# Altium footprint library Package_DFN_QFN.PcbLib: 735 footprints (part 25 of 46)
Each footprint in its own frame and in the unit in brackets; x right, y up, seen from the top. Pads: shape width x height; smd on the part's side, far side on the other; paste and mask are expansions set on the pad; w line width, h text height; cw(c..) or ccw(c..) is an arc to the next point about the centre after c.
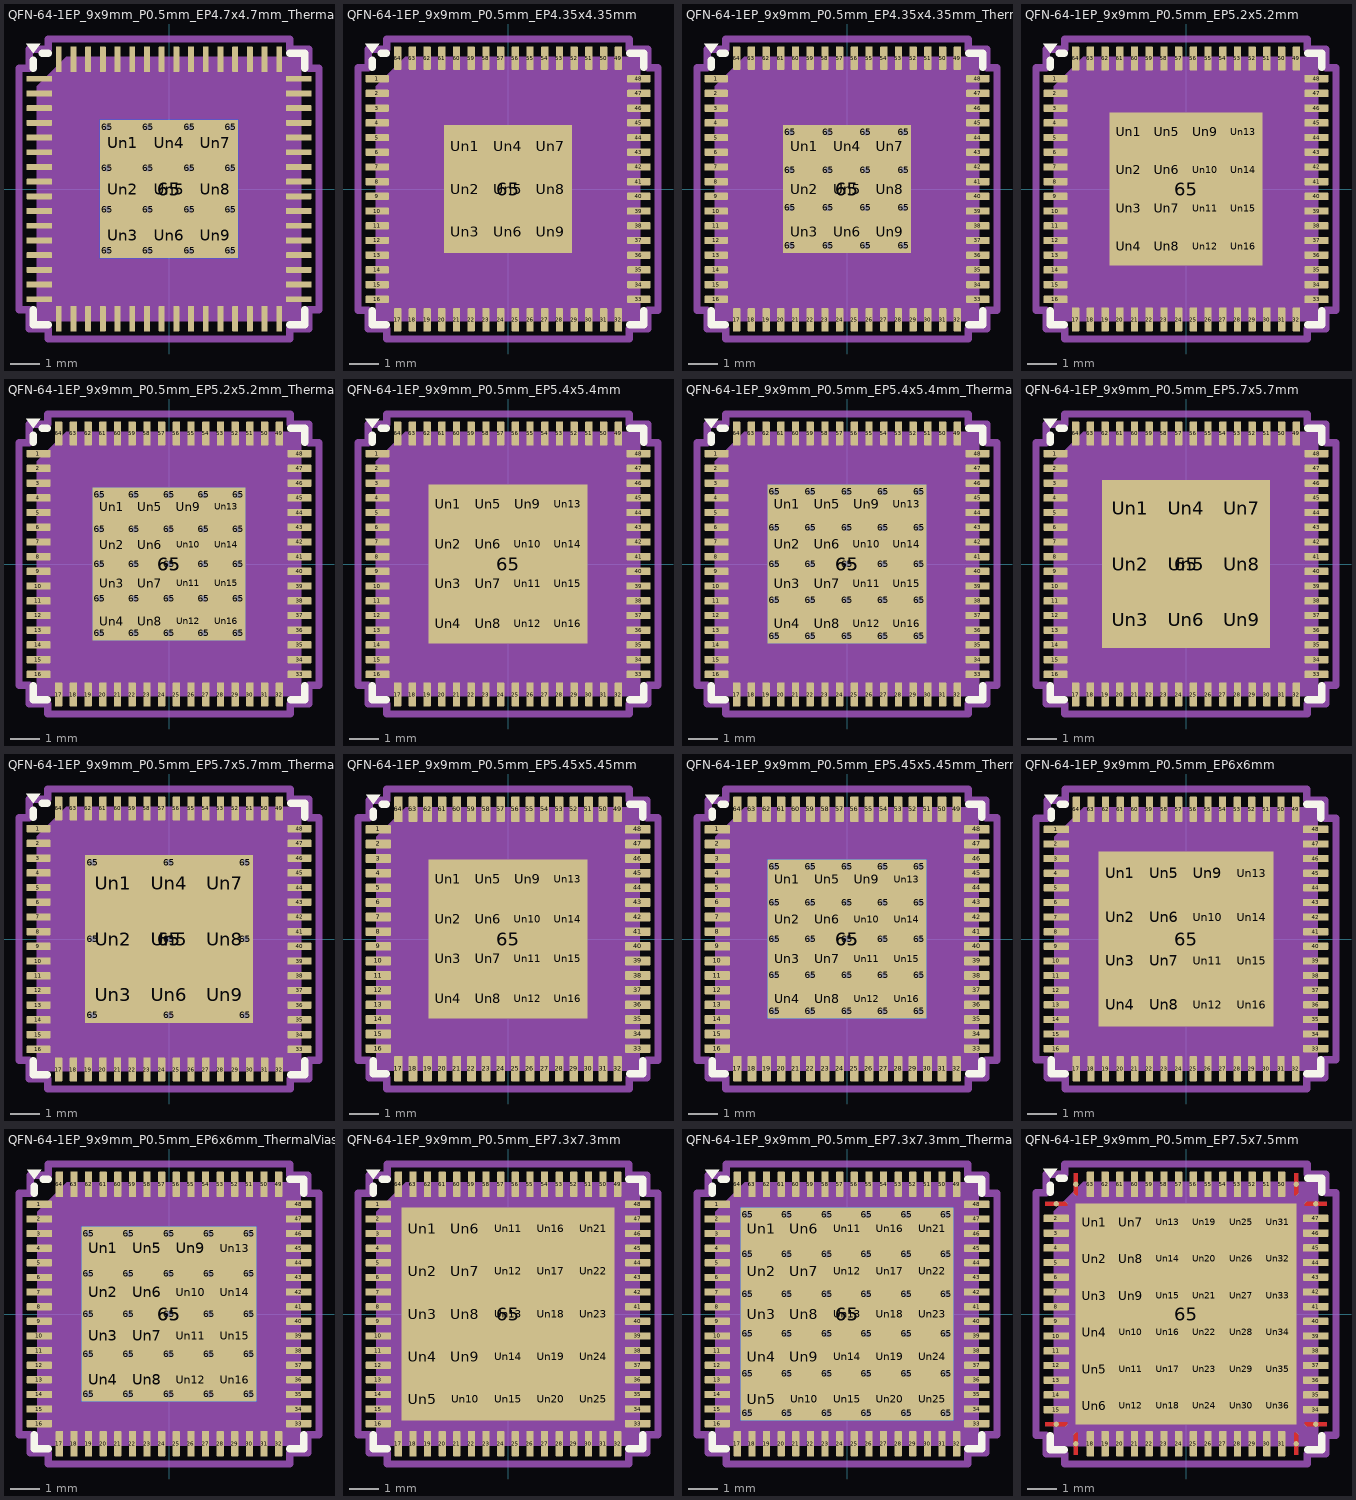
[diagram p24: the footprints below, top view; thin cyan lines are the x and y axes]

## QFN-64-1EP_9x9mm_P0.5mm_EP4.7x4.7mm_ThermalVias [mm] "QFN-64-1EP_9x9mm_P0.5mm_EP4.7x4.7mm_ThermalVias"
pads (91):
  rrect25% 0.875x0.2 smd: 1(-4.413,3.75) 2(-4.413,3.25) 3(-4.413,2.75) 4(-4.413,2.25) 5(-4.413,1.75) 6(-4.413,1.25) 7(-4.413,0.75) 8(-4.413,0.25) 9(-4.413,-0.25) 10(-4.413,-0.75) 11(-4.413,-1.25) 12(-4.413,-1.75) 13(-4.413,-2.25) 14(-4.413,-2.75) 15(-4.413,-3.25) 16(-4.413,-3.75) 33(4.413,-3.75) 34(4.413,-3.25) 35(4.413,-2.75) 36(4.413,-2.25) 37(4.413,-1.75) 38(4.413,-1.25) 39(4.413,-0.75) 40(4.413,-0.25) 41(4.413,0.25) 42(4.413,0.75) 43(4.413,1.25) 44(4.413,1.75) 45(4.413,2.25) 46(4.413,2.75) 47(4.413,3.25) 48(4.413,3.75)
  rrect25% 0.2x0.875 smd: 17(-3.75,-4.413) 18(-3.25,-4.413) 19(-2.75,-4.413) 20(-2.25,-4.413) 21(-1.75,-4.413) 22(-1.25,-4.413) 23(-0.75,-4.413) 24(-0.25,-4.413) 25(0.25,-4.413) 26(0.75,-4.413) 27(1.25,-4.413) 28(1.75,-4.413) 29(2.25,-4.413) 30(2.75,-4.413) 31(3.25,-4.413) 32(3.75,-4.413) 49(3.75,4.413) 50(3.25,4.413) 51(2.75,4.413) 52(2.25,4.413) 53(1.75,4.413) 54(1.25,4.413) 55(0.75,4.413) 56(0.25,4.413) 57(-0.25,4.413) 58(-0.75,4.413) 59(-1.25,4.413) 60(-1.75,4.413) 61(-2.25,4.413) 62(-2.75,4.413) 63(-3.25,4.413) 64(-3.75,4.413)
  round 0.5 hole 0.2: 65(-2.1,-2.1) 65(-2.1,-0.7) 65(-2.1,0.7) 65(-2.1,2.1) 65(-0.7,-2.1) 65(-0.7,-0.7) 65(-0.7,0.7) 65(-0.7,2.1) 65(0.7,-2.1) 65(0.7,-0.7) 65(0.7,0.7) 65(0.7,2.1) 65(2.1,-2.1) 65(2.1,-0.7) 65(2.1,0.7) 65(2.1,2.1)
  rect 4.7x4.7 smd: 65(0,0)
  rect 4.7x4.7 smd far side: 65(0,0)
  rrect20% 1.26x1.26 on Top Paste: Un1(-1.57,1.57) Un2(-1.57,0) Un3(-1.57,-1.57) Un4(0,1.57) Un5(0,0) Un6(0,-1.57) Un7(1.57,1.57) Un8(1.57,0) Un9(1.57,-1.57)
F.SilkS:
  region: -4.61,4.61 -4.85,4.94 -4.37,4.94
  lines w0.254: -4.61,-4.11 -4.61,-4.61 -4.11,-4.61 ; -4.61,4.11 -4.61,4.37 ; -4.31,4.61 -4.11,4.61 ; 4.11,-4.61 4.61,-4.61 4.61,-4.11 ; 4.11,4.61 4.61,4.61 4.61,4.11
Top Component Center:
  lines w0.127: -0.127,0 0.127,0 -0.127,0 ; 0,-0.127 0,0.127 0,-0.127
Top Assembly:
  region: 4.5,-4.5 -4.5,-4.5 -4.5,3.5 -3.5,4.5 4.5,4.5
Top Courtyard:
  lines w0.254: -5.1,-4.1 -5.1,4.1 -4.75,4.1 -4.75,4.75 -4.1,4.75 -4.1,5.1 4.1,5.1 4.1,4.75 4.75,4.75 4.75,4.1 5.1,4.1 5.1,-4.1 4.75,-4.1 4.75,-4.75 4.1,-4.75 4.1,-5.1 -4.1,-5.1 -4.1,-4.75 -4.75,-4.75 -4.75,-4.1 -5.1,-4.1
Top Designator:
  text ".Designator" at -3.43,-0.344 h1.52
3D body "QFN-64-1EP_9x9mm_P0.5mm_EP4.1x4.1mm.step": height 0.95, standoff 0, extent -4.5,-4.5 4.5,4.5

## QFN-64-1EP_9x9mm_P0.5mm_EP4.35x4.35mm [mm] "QFN-64-1EP_9x9mm_P0.5mm_EP4.35x4.35mm"
pads (74):
  rrect25% 0.8x0.25 smd: 1(-4.45,3.75) 2(-4.45,3.25) 3(-4.45,2.75) 4(-4.45,2.25) 5(-4.45,1.75) 6(-4.45,1.25) 7(-4.45,0.75) 8(-4.45,0.25) 9(-4.45,-0.25) 10(-4.45,-0.75) 11(-4.45,-1.25) 12(-4.45,-1.75) 13(-4.45,-2.25) 14(-4.45,-2.75) 15(-4.45,-3.25) 16(-4.45,-3.75) 33(4.45,-3.75) 34(4.45,-3.25) 35(4.45,-2.75) 36(4.45,-2.25) 37(4.45,-1.75) 38(4.45,-1.25) 39(4.45,-0.75) 40(4.45,-0.25) 41(4.45,0.25) 42(4.45,0.75) 43(4.45,1.25) 44(4.45,1.75) 45(4.45,2.25) 46(4.45,2.75) 47(4.45,3.25) 48(4.45,3.75)
  rrect25% 0.25x0.8 smd: 17(-3.75,-4.45) 18(-3.25,-4.45) 19(-2.75,-4.45) 20(-2.25,-4.45) 21(-1.75,-4.45) 22(-1.25,-4.45) 23(-0.75,-4.45) 24(-0.25,-4.45) 25(0.25,-4.45) 26(0.75,-4.45) 27(1.25,-4.45) 28(1.75,-4.45) 29(2.25,-4.45) 30(2.75,-4.45) 31(3.25,-4.45) 32(3.75,-4.45) 49(3.75,4.45) 50(3.25,4.45) 51(2.75,4.45) 52(2.25,4.45) 53(1.75,4.45) 54(1.25,4.45) 55(0.75,4.45) 56(0.25,4.45) 57(-0.25,4.45) 58(-0.75,4.45) 59(-1.25,4.45) 60(-1.75,4.45) 61(-2.25,4.45) 62(-2.75,4.45) 63(-3.25,4.45) 64(-3.75,4.45)
  rect 4.35x4.35 smd: 65(0,0)
  rrect21% 1.17x1.17 on Top Paste: Un1(-1.45,1.45) Un2(-1.45,0) Un3(-1.45,-1.45) Un4(0,1.45) Un5(0,0) Un6(0,-1.45) Un7(1.45,1.45) Un8(1.45,0) Un9(1.45,-1.45)
F.SilkS:
  region: -4.61,4.61 -4.85,4.94 -4.37,4.94
  lines w0.254: -4.61,-4.135 -4.61,-4.61 -4.135,-4.61 ; -4.61,4.135 -4.61,4.37 ; -4.31,4.61 -4.135,4.61 ; 4.135,-4.61 4.61,-4.61 4.61,-4.135 ; 4.135,4.61 4.61,4.61 4.61,4.135
Top Component Center:
  lines w0.127: -0.127,0 0.127,0 -0.127,0 ; 0,-0.127 0,0.127 0,-0.127
Top Assembly:
  region: 4.5,-4.5 -4.5,-4.5 -4.5,3.5 -3.5,4.5 4.5,4.5
Top Courtyard:
  lines w0.254: -5.1,-4.13 -4.75,-4.13 -4.75,-4.75 -4.13,-4.75 -4.13,-5.1 4.13,-5.1 4.13,-4.75 4.75,-4.75 4.75,-4.13 5.1,-4.13 5.1,4.13 4.75,4.13 4.75,4.75 4.13,4.75 4.13,5.1 -4.13,5.1 -4.13,4.75 -4.75,4.75 -4.75,4.13 -5.1,4.13 -5.1,-4.13
Top Designator:
  text ".Designator" at -3.43,-0.344 h1.52
3D body "QFN-64-1EP_9x9mm_P0.5mm_EP4.1x4.1mm.step": height 0.95, standoff 0, extent -4.5,-4.5 4.5,4.5

## QFN-64-1EP_9x9mm_P0.5mm_EP4.35x4.35mm_ThermalVias [mm] "QFN-64-1EP_9x9mm_P0.5mm_EP4.35x4.35mm_ThermalVias"
pads (91):
  rrect25% 0.8x0.25 smd: 1(-4.45,3.75) 2(-4.45,3.25) 3(-4.45,2.75) 4(-4.45,2.25) 5(-4.45,1.75) 6(-4.45,1.25) 7(-4.45,0.75) 8(-4.45,0.25) 9(-4.45,-0.25) 10(-4.45,-0.75) 11(-4.45,-1.25) 12(-4.45,-1.75) 13(-4.45,-2.25) 14(-4.45,-2.75) 15(-4.45,-3.25) 16(-4.45,-3.75) 33(4.45,-3.75) 34(4.45,-3.25) 35(4.45,-2.75) 36(4.45,-2.25) 37(4.45,-1.75) 38(4.45,-1.25) 39(4.45,-0.75) 40(4.45,-0.25) 41(4.45,0.25) 42(4.45,0.75) 43(4.45,1.25) 44(4.45,1.75) 45(4.45,2.25) 46(4.45,2.75) 47(4.45,3.25) 48(4.45,3.75)
  rrect25% 0.25x0.8 smd: 17(-3.75,-4.45) 18(-3.25,-4.45) 19(-2.75,-4.45) 20(-2.25,-4.45) 21(-1.75,-4.45) 22(-1.25,-4.45) 23(-0.75,-4.45) 24(-0.25,-4.45) 25(0.25,-4.45) 26(0.75,-4.45) 27(1.25,-4.45) 28(1.75,-4.45) 29(2.25,-4.45) 30(2.75,-4.45) 31(3.25,-4.45) 32(3.75,-4.45) 49(3.75,4.45) 50(3.25,4.45) 51(2.75,4.45) 52(2.25,4.45) 53(1.75,4.45) 54(1.25,4.45) 55(0.75,4.45) 56(0.25,4.45) 57(-0.25,4.45) 58(-0.75,4.45) 59(-1.25,4.45) 60(-1.75,4.45) 61(-2.25,4.45) 62(-2.75,4.45) 63(-3.25,4.45) 64(-3.75,4.45)
  round 0.5 hole 0.2: 65(-1.925,-1.925) 65(-1.925,-0.642) 65(-1.925,0.642) 65(-1.925,1.925) 65(-0.642,-1.925) 65(-0.642,-0.642) 65(-0.642,0.642) 65(-0.642,1.925) 65(0.642,-1.925) 65(0.642,-0.642) 65(0.642,0.642) 65(0.642,1.925) 65(1.925,-1.925) 65(1.925,-0.642) 65(1.925,0.642) 65(1.925,1.925)
  rect 4.35x4.35 smd: 65(0,0)
  rect 4.35x4.35 smd far side: 65(0,0)
  rrect22% 1.12x1.12 on Top Paste: Un1(-1.45,1.45) Un2(-1.45,0) Un3(-1.45,-1.45) Un4(0,1.45) Un5(0,0) Un6(0,-1.45) Un7(1.45,1.45) Un8(1.45,0) Un9(1.45,-1.45)
F.SilkS:
  region: -4.61,4.61 -4.85,4.94 -4.37,4.94
  lines w0.254: -4.61,-4.135 -4.61,-4.61 -4.135,-4.61 ; -4.61,4.135 -4.61,4.37 ; -4.31,4.61 -4.135,4.61 ; 4.135,-4.61 4.61,-4.61 4.61,-4.135 ; 4.135,4.61 4.61,4.61 4.61,4.135
Top Component Center:
  lines w0.127: -0.127,0 0.127,0 -0.127,0 ; 0,-0.127 0,0.127 0,-0.127
Top Assembly:
  region: 4.5,-4.5 -4.5,-4.5 -4.5,3.5 -3.5,4.5 4.5,4.5
Top Courtyard:
  lines w0.254: -5.1,-4.13 -4.75,-4.13 -4.75,-4.75 -4.13,-4.75 -4.13,-5.1 4.13,-5.1 4.13,-4.75 4.75,-4.75 4.75,-4.13 5.1,-4.13 5.1,4.13 4.75,4.13 4.75,4.75 4.13,4.75 4.13,5.1 -4.13,5.1 -4.13,4.75 -4.75,4.75 -4.75,4.13 -5.1,4.13 -5.1,-4.13
Top Designator:
  text ".Designator" at -3.43,-0.344 h1.52
3D body "QFN-64-1EP_9x9mm_P0.5mm_EP4.1x4.1mm.step": height 0.95, standoff 0, extent -4.5,-4.5 4.5,4.5

## QFN-64-1EP_9x9mm_P0.5mm_EP5.2x5.2mm [mm] "QFN-64-1EP_9x9mm_P0.5mm_EP5.2x5.2mm"
pads (81):
  rrect25% 0.825x0.25 smd: 1(-4.437,3.75) 2(-4.437,3.25) 3(-4.437,2.75) 4(-4.437,2.25) 5(-4.437,1.75) 6(-4.437,1.25) 7(-4.437,0.75) 8(-4.437,0.25) 9(-4.437,-0.25) 10(-4.437,-0.75) 11(-4.437,-1.25) 12(-4.437,-1.75) 13(-4.437,-2.25) 14(-4.437,-2.75) 15(-4.437,-3.25) 16(-4.437,-3.75) 33(4.437,-3.75) 34(4.437,-3.25) 35(4.437,-2.75) 36(4.437,-2.25) 37(4.437,-1.75) 38(4.437,-1.25) 39(4.437,-0.75) 40(4.437,-0.25) 41(4.437,0.25) 42(4.437,0.75) 43(4.437,1.25) 44(4.437,1.75) 45(4.437,2.25) 46(4.437,2.75) 47(4.437,3.25) 48(4.437,3.75)
  rrect25% 0.25x0.825 smd: 17(-3.75,-4.437) 18(-3.25,-4.437) 19(-2.75,-4.437) 20(-2.25,-4.437) 21(-1.75,-4.437) 22(-1.25,-4.437) 23(-0.75,-4.437) 24(-0.25,-4.437) 25(0.25,-4.437) 26(0.75,-4.437) 27(1.25,-4.437) 28(1.75,-4.437) 29(2.25,-4.437) 30(2.75,-4.437) 31(3.25,-4.437) 32(3.75,-4.437) 49(3.75,4.437) 50(3.25,4.437) 51(2.75,4.437) 52(2.25,4.437) 53(1.75,4.437) 54(1.25,4.437) 55(0.75,4.437) 56(0.25,4.437) 57(-0.25,4.437) 58(-0.75,4.437) 59(-1.25,4.437) 60(-1.75,4.437) 61(-2.25,4.437) 62(-2.75,4.437) 63(-3.25,4.437) 64(-3.75,4.437)
  rect 5.2x5.2 smd: 65(0,0)
  rrect24% 1.05x1.05 on Top Paste: Un1(-1.95,1.95) Un2(-1.95,0.65) Un3(-1.95,-0.65) Un4(-1.95,-1.95) Un5(-0.65,1.95) Un6(-0.65,0.65) Un7(-0.65,-0.65) Un8(-0.65,-1.95) Un9(0.65,1.95) Un10(0.65,0.65) Un11(0.65,-0.65) Un12(0.65,-1.95) Un13(1.95,1.95) Un14(1.95,0.65) Un15(1.95,-0.65) Un16(1.95,-1.95)
F.SilkS:
  region: -4.61,4.61 -4.85,4.94 -4.37,4.94
  lines w0.254: -4.61,-4.135 -4.61,-4.61 -4.135,-4.61 ; -4.61,4.135 -4.61,4.37 ; -4.31,4.61 -4.135,4.61 ; 4.135,-4.61 4.61,-4.61 4.61,-4.135 ; 4.135,4.61 4.61,4.61 4.61,4.135
Top Component Center:
  lines w0.127: -0.127,0 0.127,0 -0.127,0 ; 0,-0.127 0,0.127 0,-0.127
Top Assembly:
  region: 4.5,-4.5 -4.5,-4.5 -4.5,3.5 -3.5,4.5 4.5,4.5
Top Courtyard:
  lines w0.254: -5.1,-4.13 -4.75,-4.13 -4.75,-4.75 -4.13,-4.75 -4.13,-5.1 4.13,-5.1 4.13,-4.75 4.75,-4.75 4.75,-4.13 5.1,-4.13 5.1,4.13 4.75,4.13 4.75,4.75 4.13,4.75 4.13,5.1 -4.13,5.1 -4.13,4.75 -4.75,4.75 -4.75,4.13 -5.1,4.13 -5.1,-4.13
Top Designator:
  text ".Designator" at -3.43,-0.344 h1.52
3D body "QFN-64-1EP_9x9mm_P0.5mm_EP4.1x4.1mm.step": height 0.95, standoff 0, extent -4.5,-4.5 4.5,4.5

## QFN-64-1EP_9x9mm_P0.5mm_EP5.2x5.2mm_ThermalVias [mm] "QFN-64-1EP_9x9mm_P0.5mm_EP5.2x5.2mm_ThermalVias"
pads (107):
  rrect25% 0.825x0.25 smd: 1(-4.437,3.75) 2(-4.437,3.25) 3(-4.437,2.75) 4(-4.437,2.25) 5(-4.437,1.75) 6(-4.437,1.25) 7(-4.437,0.75) 8(-4.437,0.25) 9(-4.437,-0.25) 10(-4.437,-0.75) 11(-4.437,-1.25) 12(-4.437,-1.75) 13(-4.437,-2.25) 14(-4.437,-2.75) 15(-4.437,-3.25) 16(-4.437,-3.75) 33(4.437,-3.75) 34(4.437,-3.25) 35(4.437,-2.75) 36(4.437,-2.25) 37(4.437,-1.75) 38(4.437,-1.25) 39(4.437,-0.75) 40(4.437,-0.25) 41(4.437,0.25) 42(4.437,0.75) 43(4.437,1.25) 44(4.437,1.75) 45(4.437,2.25) 46(4.437,2.75) 47(4.437,3.25) 48(4.437,3.75)
  rrect25% 0.25x0.825 smd: 17(-3.75,-4.437) 18(-3.25,-4.437) 19(-2.75,-4.437) 20(-2.25,-4.437) 21(-1.75,-4.437) 22(-1.25,-4.437) 23(-0.75,-4.437) 24(-0.25,-4.437) 25(0.25,-4.437) 26(0.75,-4.437) 27(1.25,-4.437) 28(1.75,-4.437) 29(2.25,-4.437) 30(2.75,-4.437) 31(3.25,-4.437) 32(3.75,-4.437) 49(3.75,4.437) 50(3.25,4.437) 51(2.75,4.437) 52(2.25,4.437) 53(1.75,4.437) 54(1.25,4.437) 55(0.75,4.437) 56(0.25,4.437) 57(-0.25,4.437) 58(-0.75,4.437) 59(-1.25,4.437) 60(-1.75,4.437) 61(-2.25,4.437) 62(-2.75,4.437) 63(-3.25,4.437) 64(-3.75,4.437)
  round 0.5 hole 0.2: 65(-2.35,-2.35) 65(-2.35,-1.175) 65(-2.35,0) 65(-2.35,1.175) 65(-2.35,2.35) 65(-1.175,-2.35) 65(-1.175,-1.175) 65(-1.175,0) 65(-1.175,1.175) 65(-1.175,2.35) 65(0,-2.35) 65(0,-1.175) 65(0,0) 65(0,1.175) 65(0,2.35) 65(1.175,-2.35) 65(1.175,-1.175) 65(1.175,0) 65(1.175,1.175) 65(1.175,2.35) 65(2.35,-2.35) 65(2.35,-1.175) 65(2.35,0) 65(2.35,1.175) 65(2.35,2.35)
  rect 5.2x5.2 smd: 65(0,0)
  rect 5.2x5.2 smd far side: 65(0,0)
  rrect25% 1.01x1.01 on Top Paste: Un1(-1.95,1.95) Un2(-1.95,0.65) Un3(-1.95,-0.65) Un4(-1.95,-1.95) Un5(-0.65,1.95) Un6(-0.65,0.65) Un7(-0.65,-0.65) Un8(-0.65,-1.95) Un9(0.65,1.95) Un10(0.65,0.65) Un11(0.65,-0.65) Un12(0.65,-1.95) Un13(1.95,1.95) Un14(1.95,0.65) Un15(1.95,-0.65) Un16(1.95,-1.95)
F.SilkS:
  region: -4.61,4.61 -4.85,4.94 -4.37,4.94
  lines w0.254: -4.61,-4.135 -4.61,-4.61 -4.135,-4.61 ; -4.61,4.135 -4.61,4.37 ; -4.31,4.61 -4.135,4.61 ; 4.135,-4.61 4.61,-4.61 4.61,-4.135 ; 4.135,4.61 4.61,4.61 4.61,4.135
Top Component Center:
  lines w0.127: -0.127,0 0.127,0 -0.127,0 ; 0,-0.127 0,0.127 0,-0.127
Top Assembly:
  region: 4.5,-4.5 -4.5,-4.5 -4.5,3.5 -3.5,4.5 4.5,4.5
Top Courtyard:
  lines w0.254: -5.1,-4.13 -4.75,-4.13 -4.75,-4.75 -4.13,-4.75 -4.13,-5.1 4.13,-5.1 4.13,-4.75 4.75,-4.75 4.75,-4.13 5.1,-4.13 5.1,4.13 4.75,4.13 4.75,4.75 4.13,4.75 4.13,5.1 -4.13,5.1 -4.13,4.75 -4.75,4.75 -4.75,4.13 -5.1,4.13 -5.1,-4.13
Top Designator:
  text ".Designator" at -3.43,-0.344 h1.52
3D body "QFN-64-1EP_9x9mm_P0.5mm_EP4.1x4.1mm.step": height 0.95, standoff 0, extent -4.5,-4.5 4.5,4.5

## QFN-64-1EP_9x9mm_P0.5mm_EP5.4x5.4mm [mm] "QFN-64-1EP_9x9mm_P0.5mm_EP5.4x5.4mm"
pads (81):
  rrect25% 0.825x0.25 smd: 1(-4.437,3.75) 2(-4.437,3.25) 3(-4.437,2.75) 4(-4.437,2.25) 5(-4.437,1.75) 6(-4.437,1.25) 7(-4.437,0.75) 8(-4.437,0.25) 9(-4.437,-0.25) 10(-4.437,-0.75) 11(-4.437,-1.25) 12(-4.437,-1.75) 13(-4.437,-2.25) 14(-4.437,-2.75) 15(-4.437,-3.25) 16(-4.437,-3.75) 33(4.437,-3.75) 34(4.437,-3.25) 35(4.437,-2.75) 36(4.437,-2.25) 37(4.437,-1.75) 38(4.437,-1.25) 39(4.437,-0.75) 40(4.437,-0.25) 41(4.437,0.25) 42(4.437,0.75) 43(4.437,1.25) 44(4.437,1.75) 45(4.437,2.25) 46(4.437,2.75) 47(4.437,3.25) 48(4.437,3.75)
  rrect25% 0.25x0.825 smd: 17(-3.75,-4.437) 18(-3.25,-4.437) 19(-2.75,-4.437) 20(-2.25,-4.437) 21(-1.75,-4.437) 22(-1.25,-4.437) 23(-0.75,-4.437) 24(-0.25,-4.437) 25(0.25,-4.437) 26(0.75,-4.437) 27(1.25,-4.437) 28(1.75,-4.437) 29(2.25,-4.437) 30(2.75,-4.437) 31(3.25,-4.437) 32(3.75,-4.437) 49(3.75,4.437) 50(3.25,4.437) 51(2.75,4.437) 52(2.25,4.437) 53(1.75,4.437) 54(1.25,4.437) 55(0.75,4.437) 56(0.25,4.437) 57(-0.25,4.437) 58(-0.75,4.437) 59(-1.25,4.437) 60(-1.75,4.437) 61(-2.25,4.437) 62(-2.75,4.437) 63(-3.25,4.437) 64(-3.75,4.437)
  rect 5.4x5.4 smd: 65(0,0)
  rrect23% 1.09x1.09 on Top Paste: Un1(-2.025,2.025) Un2(-2.025,0.675) Un3(-2.025,-0.675) Un4(-2.025,-2.025) Un5(-0.675,2.025) Un6(-0.675,0.675) Un7(-0.675,-0.675) Un8(-0.675,-2.025) Un9(0.675,2.025) Un10(0.675,0.675) Un11(0.675,-0.675) Un12(0.675,-2.025) Un13(2.025,2.025) Un14(2.025,0.675) Un15(2.025,-0.675) Un16(2.025,-2.025)
F.SilkS:
  region: -4.61,4.61 -4.85,4.94 -4.37,4.94
  lines w0.254: -4.61,-4.135 -4.61,-4.61 -4.135,-4.61 ; -4.61,4.135 -4.61,4.37 ; -4.31,4.61 -4.135,4.61 ; 4.135,-4.61 4.61,-4.61 4.61,-4.135 ; 4.135,4.61 4.61,4.61 4.61,4.135
Top Component Center:
  lines w0.127: -0.127,0 0.127,0 -0.127,0 ; 0,-0.127 0,0.127 0,-0.127
Top Assembly:
  region: 4.5,-4.5 -4.5,-4.5 -4.5,3.5 -3.5,4.5 4.5,4.5
Top Courtyard:
  lines w0.254: -5.1,-4.13 -4.75,-4.13 -4.75,-4.75 -4.13,-4.75 -4.13,-5.1 4.13,-5.1 4.13,-4.75 4.75,-4.75 4.75,-4.13 5.1,-4.13 5.1,4.13 4.75,4.13 4.75,4.75 4.13,4.75 4.13,5.1 -4.13,5.1 -4.13,4.75 -4.75,4.75 -4.75,4.13 -5.1,4.13 -5.1,-4.13
Top Designator:
  text ".Designator" at -3.43,-0.344 h1.52
3D body "QFN-64-1EP_9x9mm_P0.5mm_EP4.1x4.1mm.step": height 0.95, standoff 0, extent -4.5,-4.5 4.5,4.5

## QFN-64-1EP_9x9mm_P0.5mm_EP5.4x5.4mm_ThermalVias [mm] "QFN-64-1EP_9x9mm_P0.5mm_EP5.4x5.4mm_ThermalVias"
pads (107):
  rrect25% 0.825x0.25 smd: 1(-4.437,3.75) 2(-4.437,3.25) 3(-4.437,2.75) 4(-4.437,2.25) 5(-4.437,1.75) 6(-4.437,1.25) 7(-4.437,0.75) 8(-4.437,0.25) 9(-4.437,-0.25) 10(-4.437,-0.75) 11(-4.437,-1.25) 12(-4.437,-1.75) 13(-4.437,-2.25) 14(-4.437,-2.75) 15(-4.437,-3.25) 16(-4.437,-3.75) 33(4.437,-3.75) 34(4.437,-3.25) 35(4.437,-2.75) 36(4.437,-2.25) 37(4.437,-1.75) 38(4.437,-1.25) 39(4.437,-0.75) 40(4.437,-0.25) 41(4.437,0.25) 42(4.437,0.75) 43(4.437,1.25) 44(4.437,1.75) 45(4.437,2.25) 46(4.437,2.75) 47(4.437,3.25) 48(4.437,3.75)
  rrect25% 0.25x0.825 smd: 17(-3.75,-4.437) 18(-3.25,-4.437) 19(-2.75,-4.437) 20(-2.25,-4.437) 21(-1.75,-4.437) 22(-1.25,-4.437) 23(-0.75,-4.437) 24(-0.25,-4.437) 25(0.25,-4.437) 26(0.75,-4.437) 27(1.25,-4.437) 28(1.75,-4.437) 29(2.25,-4.437) 30(2.75,-4.437) 31(3.25,-4.437) 32(3.75,-4.437) 49(3.75,4.437) 50(3.25,4.437) 51(2.75,4.437) 52(2.25,4.437) 53(1.75,4.437) 54(1.25,4.437) 55(0.75,4.437) 56(0.25,4.437) 57(-0.25,4.437) 58(-0.75,4.437) 59(-1.25,4.437) 60(-1.75,4.437) 61(-2.25,4.437) 62(-2.75,4.437) 63(-3.25,4.437) 64(-3.75,4.437)
  round 0.5 hole 0.2: 65(-2.45,-2.45) 65(-2.45,-1.225) 65(-2.45,0) 65(-2.45,1.225) 65(-2.45,2.45) 65(-1.225,-2.45) 65(-1.225,-1.225) 65(-1.225,0) 65(-1.225,1.225) 65(-1.225,2.45) 65(0,-2.45) 65(0,-1.225) 65(0,0) 65(0,1.225) 65(0,2.45) 65(1.225,-2.45) 65(1.225,-1.225) 65(1.225,0) 65(1.225,1.225) 65(1.225,2.45) 65(2.45,-2.45) 65(2.45,-1.225) 65(2.45,0) 65(2.45,1.225) 65(2.45,2.45)
  rect 5.4x5.4 smd: 65(0,0)
  rect 5.4x5.4 smd far side: 65(0,0)
  rrect23% 1.09x1.09 on Top Paste: Un1(-2.025,2.025) Un2(-2.025,0.675) Un3(-2.025,-0.675) Un4(-2.025,-2.025) Un5(-0.675,2.025) Un6(-0.675,0.675) Un7(-0.675,-0.675) Un8(-0.675,-2.025) Un9(0.675,2.025) Un10(0.675,0.675) Un11(0.675,-0.675) Un12(0.675,-2.025) Un13(2.025,2.025) Un14(2.025,0.675) Un15(2.025,-0.675) Un16(2.025,-2.025)
F.SilkS:
  region: -4.61,4.61 -4.85,4.94 -4.37,4.94
  lines w0.254: -4.61,-4.135 -4.61,-4.61 -4.135,-4.61 ; -4.61,4.135 -4.61,4.37 ; -4.31,4.61 -4.135,4.61 ; 4.135,-4.61 4.61,-4.61 4.61,-4.135 ; 4.135,4.61 4.61,4.61 4.61,4.135
Top Component Center:
  lines w0.127: -0.127,0 0.127,0 -0.127,0 ; 0,-0.127 0,0.127 0,-0.127
Top Assembly:
  region: 4.5,-4.5 -4.5,-4.5 -4.5,3.5 -3.5,4.5 4.5,4.5
Top Courtyard:
  lines w0.254: -5.1,-4.13 -5.1,4.13 -4.75,4.13 -4.75,4.75 -4.13,4.75 -4.13,5.1 4.13,5.1 4.13,4.75 4.75,4.75 4.75,4.13 5.1,4.13 5.1,-4.13 4.75,-4.13 4.75,-4.75 4.13,-4.75 4.13,-5.1 -4.13,-5.1 -4.13,-4.75 -4.75,-4.75 -4.75,-4.13 -5.1,-4.13
Top Designator:
  text ".Designator" at -3.43,-0.344 h1.52
3D body "QFN-64-1EP_9x9mm_P0.5mm_EP4.1x4.1mm.step": height 0.95, standoff 0, extent -4.5,-4.5 4.5,4.5

## QFN-64-1EP_9x9mm_P0.5mm_EP5.7x5.7mm [mm] "QFN-64-1EP_9x9mm_P0.5mm_EP5.7x5.7mm"
pads (74):
  rrect25% 0.825x0.25 smd: 1(-4.437,3.75) 2(-4.437,3.25) 3(-4.437,2.75) 4(-4.437,2.25) 5(-4.437,1.75) 6(-4.437,1.25) 7(-4.437,0.75) 8(-4.437,0.25) 9(-4.437,-0.25) 10(-4.437,-0.75) 11(-4.437,-1.25) 12(-4.437,-1.75) 13(-4.437,-2.25) 14(-4.437,-2.75) 15(-4.437,-3.25) 16(-4.437,-3.75) 33(4.437,-3.75) 34(4.437,-3.25) 35(4.437,-2.75) 36(4.437,-2.25) 37(4.437,-1.75) 38(4.437,-1.25) 39(4.437,-0.75) 40(4.437,-0.25) 41(4.437,0.25) 42(4.437,0.75) 43(4.437,1.25) 44(4.437,1.75) 45(4.437,2.25) 46(4.437,2.75) 47(4.437,3.25) 48(4.437,3.75)
  rrect25% 0.25x0.825 smd: 17(-3.75,-4.437) 18(-3.25,-4.437) 19(-2.75,-4.437) 20(-2.25,-4.437) 21(-1.75,-4.437) 22(-1.25,-4.437) 23(-0.75,-4.437) 24(-0.25,-4.437) 25(0.25,-4.437) 26(0.75,-4.437) 27(1.25,-4.437) 28(1.75,-4.437) 29(2.25,-4.437) 30(2.75,-4.437) 31(3.25,-4.437) 32(3.75,-4.437) 49(3.75,4.437) 50(3.25,4.437) 51(2.75,4.437) 52(2.25,4.437) 53(1.75,4.437) 54(1.25,4.437) 55(0.75,4.437) 56(0.25,4.437) 57(-0.25,4.437) 58(-0.75,4.437) 59(-1.25,4.437) 60(-1.75,4.437) 61(-2.25,4.437) 62(-2.75,4.437) 63(-3.25,4.437) 64(-3.75,4.437)
  rect 5.7x5.7 smd: 65(0,0)
  rrect16% 1.53x1.53 on Top Paste: Un1(-1.9,1.9) Un2(-1.9,0) Un3(-1.9,-1.9) Un4(0,1.9) Un5(0,0) Un6(0,-1.9) Un7(1.9,1.9) Un8(1.9,0) Un9(1.9,-1.9)
F.SilkS:
  region: -4.61,4.61 -4.85,4.94 -4.37,4.94
  lines w0.254: -4.61,-4.135 -4.61,-4.61 -4.135,-4.61 ; -4.61,4.135 -4.61,4.37 ; -4.31,4.61 -4.135,4.61 ; 4.135,-4.61 4.61,-4.61 4.61,-4.135 ; 4.135,4.61 4.61,4.61 4.61,4.135
Top Component Center:
  lines w0.127: -0.127,0 0.127,0 -0.127,0 ; 0,-0.127 0,0.127 0,-0.127
Top Assembly:
  region: 4.5,-4.5 -4.5,-4.5 -4.5,3.5 -3.5,4.5 4.5,4.5
Top Courtyard:
  lines w0.254: -5.1,-4.13 -4.75,-4.13 -4.75,-4.75 -4.13,-4.75 -4.13,-5.1 4.13,-5.1 4.13,-4.75 4.75,-4.75 4.75,-4.13 5.1,-4.13 5.1,4.13 4.75,4.13 4.75,4.75 4.13,4.75 4.13,5.1 -4.13,5.1 -4.13,4.75 -4.75,4.75 -4.75,4.13 -5.1,4.13 -5.1,-4.13
Top Designator:
  text ".Designator" at -3.43,-0.344 h1.52
3D body "QFN-64-1EP_9x9mm_P0.5mm_EP4.1x4.1mm.step": height 0.95, standoff 0, extent -4.5,-4.5 4.5,4.5

## QFN-64-1EP_9x9mm_P0.5mm_EP5.7x5.7mm_ThermalVias [mm] "QFN-64-1EP_9x9mm_P0.5mm_EP5.7x5.7mm_ThermalVias"
pads (84):
  rrect25% 0.825x0.25 smd: 1(-4.437,3.75) 2(-4.437,3.25) 3(-4.437,2.75) 4(-4.437,2.25) 5(-4.437,1.75) 6(-4.437,1.25) 7(-4.437,0.75) 8(-4.437,0.25) 9(-4.437,-0.25) 10(-4.437,-0.75) 11(-4.437,-1.25) 12(-4.437,-1.75) 13(-4.437,-2.25) 14(-4.437,-2.75) 15(-4.437,-3.25) 16(-4.437,-3.75) 33(4.437,-3.75) 34(4.437,-3.25) 35(4.437,-2.75) 36(4.437,-2.25) 37(4.437,-1.75) 38(4.437,-1.25) 39(4.437,-0.75) 40(4.437,-0.25) 41(4.437,0.25) 42(4.437,0.75) 43(4.437,1.25) 44(4.437,1.75) 45(4.437,2.25) 46(4.437,2.75) 47(4.437,3.25) 48(4.437,3.75)
  rrect25% 0.25x0.825 smd: 17(-3.75,-4.437) 18(-3.25,-4.437) 19(-2.75,-4.437) 20(-2.25,-4.437) 21(-1.75,-4.437) 22(-1.25,-4.437) 23(-0.75,-4.437) 24(-0.25,-4.437) 25(0.25,-4.437) 26(0.75,-4.437) 27(1.25,-4.437) 28(1.75,-4.437) 29(2.25,-4.437) 30(2.75,-4.437) 31(3.25,-4.437) 32(3.75,-4.437) 49(3.75,4.437) 50(3.25,4.437) 51(2.75,4.437) 52(2.25,4.437) 53(1.75,4.437) 54(1.25,4.437) 55(0.75,4.437) 56(0.25,4.437) 57(-0.25,4.437) 58(-0.75,4.437) 59(-1.25,4.437) 60(-1.75,4.437) 61(-2.25,4.437) 62(-2.75,4.437) 63(-3.25,4.437) 64(-3.75,4.437)
  round 0.5 hole 0.2: 65(-2.6,-2.6) 65(-2.6,0) 65(-2.6,2.6) 65(0,-2.6) 65(0,0) 65(0,2.6) 65(2.6,-2.6) 65(2.6,0) 65(2.6,2.6)
  rect 5.7x5.7 smd: 65(0,0)
  rect 5.7x5.7 smd far side: 65(0,0)
  rrect16% 1.53x1.53 on Top Paste: Un1(-1.9,1.9) Un2(-1.9,0) Un3(-1.9,-1.9) Un4(0,1.9) Un5(0,0) Un6(0,-1.9) Un7(1.9,1.9) Un8(1.9,0) Un9(1.9,-1.9)
F.SilkS:
  region: -4.61,4.61 -4.85,4.94 -4.37,4.94
  lines w0.254: -4.61,-4.135 -4.61,-4.61 -4.135,-4.61 ; -4.61,4.135 -4.61,4.37 ; -4.31,4.61 -4.135,4.61 ; 4.135,-4.61 4.61,-4.61 4.61,-4.135 ; 4.135,4.61 4.61,4.61 4.61,4.135
Top Component Center:
  lines w0.127: -0.127,0 0.127,0 -0.127,0 ; 0,-0.127 0,0.127 0,-0.127
Top Assembly:
  region: 4.5,-4.5 -4.5,-4.5 -4.5,3.5 -3.5,4.5 4.5,4.5
Top Courtyard:
  lines w0.254: -5.1,-4.13 -5.1,4.13 -4.75,4.13 -4.75,4.75 -4.13,4.75 -4.13,5.1 4.13,5.1 4.13,4.75 4.75,4.75 4.75,4.13 5.1,4.13 5.1,-4.13 4.75,-4.13 4.75,-4.75 4.13,-4.75 4.13,-5.1 -4.13,-5.1 -4.13,-4.75 -4.75,-4.75 -4.75,-4.13 -5.1,-4.13
Top Designator:
  text ".Designator" at -3.43,-0.344 h1.52
3D body "QFN-64-1EP_9x9mm_P0.5mm_EP4.1x4.1mm.step": height 0.95, standoff 0, extent -4.5,-4.5 4.5,4.5

## QFN-64-1EP_9x9mm_P0.5mm_EP5.45x5.45mm [mm] "QFN-64-1EP_9x9mm_P0.5mm_EP5.45x5.45mm"
pads (81):
  rrect25% 0.875x0.3 smd: 1(-4.437,3.75) 2(-4.437,3.25) 3(-4.437,2.75) 4(-4.437,2.25) 5(-4.437,1.75) 6(-4.437,1.25) 7(-4.437,0.75) 8(-4.437,0.25) 9(-4.437,-0.25) 10(-4.437,-0.75) 11(-4.437,-1.25) 12(-4.437,-1.75) 13(-4.437,-2.25) 14(-4.437,-2.75) 15(-4.437,-3.25) 16(-4.437,-3.75) 33(4.437,-3.75) 34(4.437,-3.25) 35(4.437,-2.75) 36(4.437,-2.25) 37(4.437,-1.75) 38(4.437,-1.25) 39(4.437,-0.75) 40(4.437,-0.25) 41(4.437,0.25) 42(4.437,0.75) 43(4.437,1.25) 44(4.437,1.75) 45(4.437,2.25) 46(4.437,2.75) 47(4.437,3.25) 48(4.437,3.75)
  rrect25% 0.3x0.875 smd: 17(-3.75,-4.437) 18(-3.25,-4.437) 19(-2.75,-4.437) 20(-2.25,-4.437) 21(-1.75,-4.437) 22(-1.25,-4.437) 23(-0.75,-4.437) 24(-0.25,-4.437) 25(0.25,-4.437) 26(0.75,-4.437) 27(1.25,-4.437) 28(1.75,-4.437) 29(2.25,-4.437) 30(2.75,-4.437) 31(3.25,-4.437) 32(3.75,-4.437) 49(3.75,4.437) 50(3.25,4.437) 51(2.75,4.437) 52(2.25,4.437) 53(1.75,4.437) 54(1.25,4.437) 55(0.75,4.437) 56(0.25,4.437) 57(-0.25,4.437) 58(-0.75,4.437) 59(-1.25,4.437) 60(-1.75,4.437) 61(-2.25,4.437) 62(-2.75,4.437) 63(-3.25,4.437) 64(-3.75,4.437)
  rect 5.45x5.45 smd: 65(0,0)
  rrect23% 1.1x1.1 on Top Paste: Un1(-2.04,2.04) Un2(-2.04,0.68) Un3(-2.04,-0.68) Un4(-2.04,-2.04) Un5(-0.68,2.04) Un6(-0.68,0.68) Un7(-0.68,-0.68) Un8(-0.68,-2.04) Un9(0.68,2.04) Un10(0.68,0.68) Un11(0.68,-0.68) Un12(0.68,-2.04) Un13(2.04,2.04) Un14(2.04,0.68) Un15(2.04,-0.68) Un16(2.04,-2.04)
F.SilkS:
  region: -4.61,4.61 -4.85,4.94 -4.37,4.94
  lines w0.254: -4.61,-4.16 -4.61,-4.61 -4.16,-4.61 ; -4.61,4.16 -4.61,4.37 ; -4.31,4.61 -4.16,4.61 ; 4.16,-4.61 4.61,-4.61 4.61,-4.16 ; 4.16,4.61 4.61,4.61 4.61,4.16
Top Component Center:
  lines w0.127: -0.127,0 0.127,0 -0.127,0 ; 0,-0.127 0,0.127 0,-0.127
Top Assembly:
  region: 4.5,-4.5 -4.5,-4.5 -4.5,3.5 -3.5,4.5 4.5,4.5
Top Courtyard:
  lines w0.254: -5.13,-4.15 -5.13,4.15 -4.75,4.15 -4.75,4.75 -4.15,4.75 -4.15,5.13 4.15,5.13 4.15,4.75 4.75,4.75 4.75,4.15 5.13,4.15 5.13,-4.15 4.75,-4.15 4.75,-4.75 4.15,-4.75 4.15,-5.13 -4.15,-5.13 -4.15,-4.75 -4.75,-4.75 -4.75,-4.15 -5.13,-4.15
Top Designator:
  text ".Designator" at -3.43,-0.344 h1.52
3D body "QFN-64-1EP_9x9mm_P0.5mm_EP4.1x4.1mm.step": height 0.95, standoff 0, extent -4.5,-4.5 4.5,4.5

## QFN-64-1EP_9x9mm_P0.5mm_EP5.45x5.45mm_ThermalVias [mm] "QFN-64-1EP_9x9mm_P0.5mm_EP5.45x5.45mm_ThermalVias"
pads (107):
  rrect25% 0.875x0.3 smd: 1(-4.437,3.75) 2(-4.437,3.25) 3(-4.437,2.75) 4(-4.437,2.25) 5(-4.437,1.75) 6(-4.437,1.25) 7(-4.437,0.75) 8(-4.437,0.25) 9(-4.437,-0.25) 10(-4.437,-0.75) 11(-4.437,-1.25) 12(-4.437,-1.75) 13(-4.437,-2.25) 14(-4.437,-2.75) 15(-4.437,-3.25) 16(-4.437,-3.75) 33(4.437,-3.75) 34(4.437,-3.25) 35(4.437,-2.75) 36(4.437,-2.25) 37(4.437,-1.75) 38(4.437,-1.25) 39(4.437,-0.75) 40(4.437,-0.25) 41(4.437,0.25) 42(4.437,0.75) 43(4.437,1.25) 44(4.437,1.75) 45(4.437,2.25) 46(4.437,2.75) 47(4.437,3.25) 48(4.437,3.75)
  rrect25% 0.3x0.875 smd: 17(-3.75,-4.437) 18(-3.25,-4.437) 19(-2.75,-4.437) 20(-2.25,-4.437) 21(-1.75,-4.437) 22(-1.25,-4.437) 23(-0.75,-4.437) 24(-0.25,-4.437) 25(0.25,-4.437) 26(0.75,-4.437) 27(1.25,-4.437) 28(1.75,-4.437) 29(2.25,-4.437) 30(2.75,-4.437) 31(3.25,-4.437) 32(3.75,-4.437) 49(3.75,4.437) 50(3.25,4.437) 51(2.75,4.437) 52(2.25,4.437) 53(1.75,4.437) 54(1.25,4.437) 55(0.75,4.437) 56(0.25,4.437) 57(-0.25,4.437) 58(-0.75,4.437) 59(-1.25,4.437) 60(-1.75,4.437) 61(-2.25,4.437) 62(-2.75,4.437) 63(-3.25,4.437) 64(-3.75,4.437)
  round 0.5 hole 0.2: 65(-2.475,-2.475) 65(-2.475,-1.238) 65(-2.475,0) 65(-2.475,1.238) 65(-2.475,2.475) 65(-1.238,-2.475) 65(-1.238,-1.238) 65(-1.238,0) 65(-1.238,1.238) 65(-1.238,2.475) 65(0,-2.475) 65(0,-1.238) 65(0,0) 65(0,1.238) 65(0,2.475) 65(1.238,-2.475) 65(1.238,-1.238) 65(1.238,0) 65(1.238,1.238) 65(1.238,2.475) 65(2.475,-2.475) 65(2.475,-1.238) 65(2.475,0) 65(2.475,1.238) 65(2.475,2.475)
  rect 5.45x5.45 smd: 65(0,0)
  rect 5.45x5.45 smd far side: 65(0,0)
  rrect24% 1.06x1.06 on Top Paste: Un1(-2.04,2.04) Un2(-2.04,0.68) Un3(-2.04,-0.68) Un4(-2.04,-2.04) Un5(-0.68,2.04) Un6(-0.68,0.68) Un7(-0.68,-0.68) Un8(-0.68,-2.04) Un9(0.68,2.04) Un10(0.68,0.68) Un11(0.68,-0.68) Un12(0.68,-2.04) Un13(2.04,2.04) Un14(2.04,0.68) Un15(2.04,-0.68) Un16(2.04,-2.04)
F.SilkS:
  region: -4.61,4.61 -4.85,4.94 -4.37,4.94
  lines w0.254: -4.61,-4.16 -4.61,-4.61 -4.16,-4.61 ; -4.61,4.16 -4.61,4.37 ; -4.31,4.61 -4.16,4.61 ; 4.16,-4.61 4.61,-4.61 4.61,-4.16 ; 4.16,4.61 4.61,4.61 4.61,4.16
Top Component Center:
  lines w0.127: -0.127,0 0.127,0 -0.127,0 ; 0,-0.127 0,0.127 0,-0.127
Top Assembly:
  region: 4.5,-4.5 -4.5,-4.5 -4.5,3.5 -3.5,4.5 4.5,4.5
Top Courtyard:
  lines w0.254: -5.13,-4.15 -4.75,-4.15 -4.75,-4.75 -4.15,-4.75 -4.15,-5.13 4.15,-5.13 4.15,-4.75 4.75,-4.75 4.75,-4.15 5.13,-4.15 5.13,4.15 4.75,4.15 4.75,4.75 4.15,4.75 4.15,5.13 -4.15,5.13 -4.15,4.75 -4.75,4.75 -4.75,4.15 -5.13,4.15 -5.13,-4.15
Top Designator:
  text ".Designator" at -3.43,-0.344 h1.52
3D body "QFN-64-1EP_9x9mm_P0.5mm_EP4.1x4.1mm.step": height 0.95, standoff 0, extent -4.5,-4.5 4.5,4.5

## QFN-64-1EP_9x9mm_P0.5mm_EP6x6mm [mm] "QFN-64-1EP_9x9mm_P0.5mm_EP6x6mm"
pads (81):
  rrect25% 0.875x0.25 smd: 1(-4.437,3.75) 2(-4.437,3.25) 3(-4.437,2.75) 4(-4.437,2.25) 5(-4.437,1.75) 6(-4.437,1.25) 7(-4.437,0.75) 8(-4.437,0.25) 9(-4.437,-0.25) 10(-4.437,-0.75) 11(-4.437,-1.25) 12(-4.437,-1.75) 13(-4.437,-2.25) 14(-4.437,-2.75) 15(-4.437,-3.25) 16(-4.437,-3.75) 33(4.437,-3.75) 34(4.437,-3.25) 35(4.437,-2.75) 36(4.437,-2.25) 37(4.437,-1.75) 38(4.437,-1.25) 39(4.437,-0.75) 40(4.437,-0.25) 41(4.437,0.25) 42(4.437,0.75) 43(4.437,1.25) 44(4.437,1.75) 45(4.437,2.25) 46(4.437,2.75) 47(4.437,3.25) 48(4.437,3.75)
  rrect25% 0.25x0.875 smd: 17(-3.75,-4.437) 18(-3.25,-4.437) 19(-2.75,-4.437) 20(-2.25,-4.437) 21(-1.75,-4.437) 22(-1.25,-4.437) 23(-0.75,-4.437) 24(-0.25,-4.437) 25(0.25,-4.437) 26(0.75,-4.437) 27(1.25,-4.437) 28(1.75,-4.437) 29(2.25,-4.437) 30(2.75,-4.437) 31(3.25,-4.437) 32(3.75,-4.437) 49(3.75,4.437) 50(3.25,4.437) 51(2.75,4.437) 52(2.25,4.437) 53(1.75,4.437) 54(1.25,4.437) 55(0.75,4.437) 56(0.25,4.437) 57(-0.25,4.437) 58(-0.75,4.437) 59(-1.25,4.437) 60(-1.75,4.437) 61(-2.25,4.437) 62(-2.75,4.437) 63(-3.25,4.437) 64(-3.75,4.437)
  rect 6x6 smd: 65(0,0)
  rrect21% 1.21x1.21 on Top Paste: Un1(-2.25,2.25) Un2(-2.25,0.75) Un3(-2.25,-0.75) Un4(-2.25,-2.25) Un5(-0.75,2.25) Un6(-0.75,0.75) Un7(-0.75,-0.75) Un8(-0.75,-2.25) Un9(0.75,2.25) Un10(0.75,0.75) Un11(0.75,-0.75) Un12(0.75,-2.25) Un13(2.25,2.25) Un14(2.25,0.75) Un15(2.25,-0.75) Un16(2.25,-2.25)
F.SilkS:
  region: -4.61,4.61 -4.85,4.94 -4.37,4.94
  lines w0.254: -4.61,-4.135 -4.61,-4.61 -4.135,-4.61 ; -4.61,4.135 -4.61,4.37 ; -4.31,4.61 -4.135,4.61 ; 4.135,-4.61 4.61,-4.61 4.61,-4.135 ; 4.135,4.61 4.61,4.61 4.61,4.135
Top Component Center:
  lines w0.127: -0.127,0 0.127,0 -0.127,0 ; 0,-0.127 0,0.127 0,-0.127
Top Assembly:
  region: 4.5,-4.5 -4.5,-4.5 -4.5,3.5 -3.5,4.5 4.5,4.5
Top Courtyard:
  lines w0.254: -5.13,-4.13 -5.13,4.13 -4.75,4.13 -4.75,4.75 -4.13,4.75 -4.13,5.13 4.13,5.13 4.13,4.75 4.75,4.75 4.75,4.13 5.13,4.13 5.13,-4.13 4.75,-4.13 4.75,-4.75 4.13,-4.75 4.13,-5.13 -4.13,-5.13 -4.13,-4.75 -4.75,-4.75 -4.75,-4.13 -5.13,-4.13
Top Designator:
  text ".Designator" at -3.43,-0.344 h1.52
3D body "QFN-64-1EP_9x9mm_P0.5mm_EP7.35x7.35mm.step": height 0.75, standoff 0, extent -4.5,-4.5 4.5,4.5

## QFN-64-1EP_9x9mm_P0.5mm_EP6x6mm_ThermalVias [mm] "QFN-64-1EP_9x9mm_P0.5mm_EP6x6mm_ThermalVias"
pads (107):
  rrect25% 0.875x0.25 smd: 1(-4.437,3.75) 2(-4.437,3.25) 3(-4.437,2.75) 4(-4.437,2.25) 5(-4.437,1.75) 6(-4.437,1.25) 7(-4.437,0.75) 8(-4.437,0.25) 9(-4.437,-0.25) 10(-4.437,-0.75) 11(-4.437,-1.25) 12(-4.437,-1.75) 13(-4.437,-2.25) 14(-4.437,-2.75) 15(-4.437,-3.25) 16(-4.437,-3.75) 33(4.437,-3.75) 34(4.437,-3.25) 35(4.437,-2.75) 36(4.437,-2.25) 37(4.437,-1.75) 38(4.437,-1.25) 39(4.437,-0.75) 40(4.437,-0.25) 41(4.437,0.25) 42(4.437,0.75) 43(4.437,1.25) 44(4.437,1.75) 45(4.437,2.25) 46(4.437,2.75) 47(4.437,3.25) 48(4.437,3.75)
  rrect25% 0.25x0.875 smd: 17(-3.75,-4.437) 18(-3.25,-4.437) 19(-2.75,-4.437) 20(-2.25,-4.437) 21(-1.75,-4.437) 22(-1.25,-4.437) 23(-0.75,-4.437) 24(-0.25,-4.437) 25(0.25,-4.437) 26(0.75,-4.437) 27(1.25,-4.437) 28(1.75,-4.437) 29(2.25,-4.437) 30(2.75,-4.437) 31(3.25,-4.437) 32(3.75,-4.437) 49(3.75,4.437) 50(3.25,4.437) 51(2.75,4.437) 52(2.25,4.437) 53(1.75,4.437) 54(1.25,4.437) 55(0.75,4.437) 56(0.25,4.437) 57(-0.25,4.437) 58(-0.75,4.437) 59(-1.25,4.437) 60(-1.75,4.437) 61(-2.25,4.437) 62(-2.75,4.437) 63(-3.25,4.437) 64(-3.75,4.437)
  round 0.5 hole 0.2: 65(-2.75,-2.75) 65(-2.75,-1.375) 65(-2.75,0) 65(-2.75,1.375) 65(-2.75,2.75) 65(-1.375,-2.75) 65(-1.375,-1.375) 65(-1.375,0) 65(-1.375,1.375) 65(-1.375,2.75) 65(0,-2.75) 65(0,-1.375) 65(0,0) 65(0,1.375) 65(0,2.75) 65(1.375,-2.75) 65(1.375,-1.375) 65(1.375,0) 65(1.375,1.375) 65(1.375,2.75) 65(2.75,-2.75) 65(2.75,-1.375) 65(2.75,0) 65(2.75,1.375) 65(2.75,2.75)
  rect 6x6 smd: 65(0,0)
  rect 6x6 smd far side: 65(0,0)
  rrect21% 1.21x1.21 on Top Paste: Un1(-2.25,2.25) Un2(-2.25,0.75) Un3(-2.25,-0.75) Un4(-2.25,-2.25) Un5(-0.75,2.25) Un6(-0.75,0.75) Un7(-0.75,-0.75) Un8(-0.75,-2.25) Un9(0.75,2.25) Un10(0.75,0.75) Un11(0.75,-0.75) Un12(0.75,-2.25) Un13(2.25,2.25) Un14(2.25,0.75) Un15(2.25,-0.75) Un16(2.25,-2.25)
F.SilkS:
  region: -4.61,4.61 -4.85,4.94 -4.37,4.94
  lines w0.254: -4.61,-4.135 -4.61,-4.61 -4.135,-4.61 ; -4.61,4.135 -4.61,4.37 ; -4.31,4.61 -4.135,4.61 ; 4.135,-4.61 4.61,-4.61 4.61,-4.135 ; 4.135,4.61 4.61,4.61 4.61,4.135
Top Component Center:
  lines w0.127: -0.127,0 0.127,0 -0.127,0 ; 0,-0.127 0,0.127 0,-0.127
Top Assembly:
  region: 4.5,-4.5 -4.5,-4.5 -4.5,3.5 -3.5,4.5 4.5,4.5
Top Courtyard:
  lines w0.254: -5.13,-4.13 -4.75,-4.13 -4.75,-4.75 -4.13,-4.75 -4.13,-5.13 4.13,-5.13 4.13,-4.75 4.75,-4.75 4.75,-4.13 5.13,-4.13 5.13,4.13 4.75,4.13 4.75,4.75 4.13,4.75 4.13,5.13 -4.13,5.13 -4.13,4.75 -4.75,4.75 -4.75,4.13 -5.13,4.13 -5.13,-4.13
Top Designator:
  text ".Designator" at -3.43,-0.344 h1.52
3D body "QFN-64-1EP_9x9mm_P0.5mm_EP7.35x7.35mm.step": height 0.75, standoff 0, extent -4.5,-4.5 4.5,4.5

## QFN-64-1EP_9x9mm_P0.5mm_EP7.3x7.3mm [mm] "QFN-64-1EP_9x9mm_P0.5mm_EP7.3x7.3mm"
pads (90):
  rrect25% 0.875x0.25 smd: 1(-4.437,3.75) 2(-4.437,3.25) 3(-4.437,2.75) 4(-4.437,2.25) 5(-4.437,1.75) 6(-4.437,1.25) 7(-4.437,0.75) 8(-4.437,0.25) 9(-4.437,-0.25) 10(-4.437,-0.75) 11(-4.437,-1.25) 12(-4.437,-1.75) 13(-4.437,-2.25) 14(-4.437,-2.75) 15(-4.437,-3.25) 16(-4.437,-3.75) 33(4.437,-3.75) 34(4.437,-3.25) 35(4.437,-2.75) 36(4.437,-2.25) 37(4.437,-1.75) 38(4.437,-1.25) 39(4.437,-0.75) 40(4.437,-0.25) 41(4.437,0.25) 42(4.437,0.75) 43(4.437,1.25) 44(4.437,1.75) 45(4.437,2.25) 46(4.437,2.75) 47(4.437,3.25) 48(4.437,3.75)
  rrect25% 0.25x0.875 smd: 17(-3.75,-4.437) 18(-3.25,-4.437) 19(-2.75,-4.437) 20(-2.25,-4.437) 21(-1.75,-4.437) 22(-1.25,-4.437) 23(-0.75,-4.437) 24(-0.25,-4.437) 25(0.25,-4.437) 26(0.75,-4.437) 27(1.25,-4.437) 28(1.75,-4.437) 29(2.25,-4.437) 30(2.75,-4.437) 31(3.25,-4.437) 32(3.75,-4.437) 49(3.75,4.437) 50(3.25,4.437) 51(2.75,4.437) 52(2.25,4.437) 53(1.75,4.437) 54(1.25,4.437) 55(0.75,4.437) 56(0.25,4.437) 57(-0.25,4.437) 58(-0.75,4.437) 59(-1.25,4.437) 60(-1.75,4.437) 61(-2.25,4.437) 62(-2.75,4.437) 63(-3.25,4.437) 64(-3.75,4.437)
  rect 7.3x7.3 smd: 65(0,0)
  rrect21% 1.18x1.18 on Top Paste: Un1(-2.92,2.92) Un2(-2.92,1.46) Un3(-2.92,0) Un4(-2.92,-1.46) Un5(-2.92,-2.92) Un6(-1.46,2.92) Un7(-1.46,1.46) Un8(-1.46,0) Un9(-1.46,-1.46) Un10(-1.46,-2.92) Un11(0,2.92) Un12(0,1.46) Un13(0,0) Un14(0,-1.46) Un15(0,-2.92) Un16(1.46,2.92) Un17(1.46,1.46) Un18(1.46,0) Un19(1.46,-1.46) Un20(1.46,-2.92) Un21(2.92,2.92) Un22(2.92,1.46) Un23(2.92,0) Un24(2.92,-1.46) Un25(2.92,-2.92)
F.SilkS:
  region: -4.61,4.61 -4.85,4.94 -4.37,4.94
  lines w0.254: -4.61,-4.135 -4.61,-4.61 -4.135,-4.61 ; -4.61,4.135 -4.61,4.37 ; -4.31,4.61 -4.135,4.61 ; 4.135,-4.61 4.61,-4.61 4.61,-4.135 ; 4.135,4.61 4.61,4.61 4.61,4.135
Top Component Center:
  lines w0.127: -0.127,0 0.127,0 -0.127,0 ; 0,-0.127 0,0.127 0,-0.127
Top Assembly:
  region: 4.5,-4.5 -4.5,-4.5 -4.5,3.5 -3.5,4.5 4.5,4.5
Top Courtyard:
  lines w0.254: -5.13,-4.13 -4.75,-4.13 -4.75,-4.75 -4.13,-4.75 -4.13,-5.13 4.13,-5.13 4.13,-4.75 4.75,-4.75 4.75,-4.13 5.13,-4.13 5.13,4.13 4.75,4.13 4.75,4.75 4.13,4.75 4.13,5.13 -4.13,5.13 -4.13,4.75 -4.75,4.75 -4.75,4.13 -5.13,4.13 -5.13,-4.13
Top Designator:
  text ".Designator" at -3.43,-0.344 h1.52
3D body "QFN-64-1EP_9x9mm_P0.5mm_EP7.35x7.35mm.step": height 0.75, standoff 0, extent -4.5,-4.5 4.5,4.5

## QFN-64-1EP_9x9mm_P0.5mm_EP7.3x7.3mm_ThermalVias [mm] "QFN-64-1EP_9x9mm_P0.5mm_EP7.3x7.3mm_ThermalVias"
pads (127):
  rrect25% 0.875x0.25 smd: 1(-4.437,3.75) 2(-4.437,3.25) 3(-4.437,2.75) 4(-4.437,2.25) 5(-4.437,1.75) 6(-4.437,1.25) 7(-4.437,0.75) 8(-4.437,0.25) 9(-4.437,-0.25) 10(-4.437,-0.75) 11(-4.437,-1.25) 12(-4.437,-1.75) 13(-4.437,-2.25) 14(-4.437,-2.75) 15(-4.437,-3.25) 16(-4.437,-3.75) 33(4.437,-3.75) 34(4.437,-3.25) 35(4.437,-2.75) 36(4.437,-2.25) 37(4.437,-1.75) 38(4.437,-1.25) 39(4.437,-0.75) 40(4.437,-0.25) 41(4.437,0.25) 42(4.437,0.75) 43(4.437,1.25) 44(4.437,1.75) 45(4.437,2.25) 46(4.437,2.75) 47(4.437,3.25) 48(4.437,3.75)
  rrect25% 0.25x0.875 smd: 17(-3.75,-4.437) 18(-3.25,-4.437) 19(-2.75,-4.437) 20(-2.25,-4.437) 21(-1.75,-4.437) 22(-1.25,-4.437) 23(-0.75,-4.437) 24(-0.25,-4.437) 25(0.25,-4.437) 26(0.75,-4.437) 27(1.25,-4.437) 28(1.75,-4.437) 29(2.25,-4.437) 30(2.75,-4.437) 31(3.25,-4.437) 32(3.75,-4.437) 49(3.75,4.437) 50(3.25,4.437) 51(2.75,4.437) 52(2.25,4.437) 53(1.75,4.437) 54(1.25,4.437) 55(0.75,4.437) 56(0.25,4.437) 57(-0.25,4.437) 58(-0.75,4.437) 59(-1.25,4.437) 60(-1.75,4.437) 61(-2.25,4.437) 62(-2.75,4.437) 63(-3.25,4.437) 64(-3.75,4.437)
  round 0.5 hole 0.2: 65(-3.4,-3.4) 65(-3.4,-2.04) 65(-3.4,-0.68) 65(-3.4,0.68) 65(-3.4,2.04) 65(-3.4,3.4) 65(-2.04,-3.4) 65(-2.04,-2.04) 65(-2.04,-0.68) 65(-2.04,0.68) 65(-2.04,2.04) 65(-2.04,3.4) 65(-0.68,-3.4) 65(-0.68,-2.04) 65(-0.68,-0.68) 65(-0.68,0.68) 65(-0.68,2.04) 65(-0.68,3.4) 65(0.68,-3.4) 65(0.68,-2.04) 65(0.68,-0.68) 65(0.68,0.68) 65(0.68,2.04) 65(0.68,3.4) 65(2.04,-3.4) 65(2.04,-2.04) 65(2.04,-0.68) 65(2.04,0.68) 65(2.04,2.04) 65(2.04,3.4) 65(3.4,-3.4) 65(3.4,-2.04) 65(3.4,-0.68) 65(3.4,0.68) 65(3.4,2.04) 65(3.4,3.4)
  rect 7.3x7.3 smd: 65(0,0)
  rect 7.3x7.3 smd far side: 65(0,0)
  rrect21% 1.18x1.18 on Top Paste: Un1(-2.92,2.92) Un2(-2.92,1.46) Un3(-2.92,0) Un4(-2.92,-1.46) Un5(-2.92,-2.92) Un6(-1.46,2.92) Un7(-1.46,1.46) Un8(-1.46,0) Un9(-1.46,-1.46) Un10(-1.46,-2.92) Un11(0,2.92) Un12(0,1.46) Un13(0,0) Un14(0,-1.46) Un15(0,-2.92) Un16(1.46,2.92) Un17(1.46,1.46) Un18(1.46,0) Un19(1.46,-1.46) Un20(1.46,-2.92) Un21(2.92,2.92) Un22(2.92,1.46) Un23(2.92,0) Un24(2.92,-1.46) Un25(2.92,-2.92)
F.SilkS:
  region: -4.61,4.61 -4.85,4.94 -4.37,4.94
  lines w0.254: -4.61,-4.135 -4.61,-4.61 -4.135,-4.61 ; -4.61,4.135 -4.61,4.37 ; -4.31,4.61 -4.135,4.61 ; 4.135,-4.61 4.61,-4.61 4.61,-4.135 ; 4.135,4.61 4.61,4.61 4.61,4.135
Top Component Center:
  lines w0.127: -0.127,0 0.127,0 -0.127,0 ; 0,-0.127 0,0.127 0,-0.127
Top Assembly:
  region: 4.5,-4.5 -4.5,-4.5 -4.5,3.5 -3.5,4.5 4.5,4.5
Top Courtyard:
  lines w0.254: -5.13,-4.13 -4.75,-4.13 -4.75,-4.75 -4.13,-4.75 -4.13,-5.13 4.13,-5.13 4.13,-4.75 4.75,-4.75 4.75,-4.13 5.13,-4.13 5.13,4.13 4.75,4.13 4.75,4.75 4.13,4.75 4.13,5.13 -4.13,5.13 -4.13,4.75 -4.75,4.75 -4.75,4.13 -5.13,4.13 -5.13,-4.13
Top Designator:
  text ".Designator" at -3.43,-0.344 h1.52
3D body "QFN-64-1EP_9x9mm_P0.5mm_EP7.35x7.35mm.step": height 0.75, standoff 0, extent -4.5,-4.5 4.5,4.5

## QFN-64-1EP_9x9mm_P0.5mm_EP7.5x7.5mm [mm] "`QFN-64-1EP_9x9mm_P0.5mm_EP7.5x7.5mm"
pads (101):
  round 0.179 smd: 1(-4.413,3.75) 16(-4.413,-3.75) 17(-3.75,-4.413) 32(3.75,-4.413) 33(4.413,-3.75) 48(4.413,3.75) 49(3.75,4.413) 64(-3.75,4.413)
  rrect25% 0.875x0.25 smd: 2(-4.413,3.25) 3(-4.413,2.75) 4(-4.413,2.25) 5(-4.413,1.75) 6(-4.413,1.25) 7(-4.413,0.75) 8(-4.413,0.25) 9(-4.413,-0.25) 10(-4.413,-0.75) 11(-4.413,-1.25) 12(-4.413,-1.75) 13(-4.413,-2.25) 14(-4.413,-2.75) 15(-4.413,-3.25) 34(4.413,-3.25) 35(4.413,-2.75) 36(4.413,-2.25) 37(4.413,-1.75) 38(4.413,-1.25) 39(4.413,-0.75) 40(4.413,-0.25) 41(4.413,0.25) 42(4.413,0.75) 43(4.413,1.25) 44(4.413,1.75) 45(4.413,2.25) 46(4.413,2.75) 47(4.413,3.25)
  rrect25% 0.25x0.875 smd: 18(-3.25,-4.413) 19(-2.75,-4.413) 20(-2.25,-4.413) 21(-1.75,-4.413) 22(-1.25,-4.413) 23(-0.75,-4.413) 24(-0.25,-4.413) 25(0.25,-4.413) 26(0.75,-4.413) 27(1.25,-4.413) 28(1.75,-4.413) 29(2.25,-4.413) 30(2.75,-4.413) 31(3.25,-4.413) 50(3.25,4.413) 51(2.75,4.413) 52(2.25,4.413) 53(1.75,4.413) 54(1.25,4.413) 55(0.75,4.413) 56(0.25,4.413) 57(-0.25,4.413) 58(-0.75,4.413) 59(-1.25,4.413) 60(-1.75,4.413) 61(-2.25,4.413) 62(-2.75,4.413) 63(-3.25,4.413)
  rect 7.5x7.5 smd: 65(0,0)
  rrect25% 1.01x1.01 on Top Paste: Un1(-3.125,3.125) Un2(-3.125,1.875) Un3(-3.125,0.625) Un4(-3.125,-0.625) Un5(-3.125,-1.875) Un6(-3.125,-3.125) Un7(-1.875,3.125) Un8(-1.875,1.875) Un9(-1.875,0.625) Un10(-1.875,-0.625) Un11(-1.875,-1.875) Un12(-1.875,-3.125) Un13(-0.625,3.125) Un14(-0.625,1.875) Un15(-0.625,0.625) Un16(-0.625,-0.625) Un17(-0.625,-1.875) Un18(-0.625,-3.125) Un19(0.625,3.125) Un20(0.625,1.875) Un21(0.625,0.625) Un22(0.625,-0.625) Un23(0.625,-1.875) Un24(0.625,-3.125) Un25(1.875,3.125) Un26(1.875,1.875) Un27(1.875,0.625) Un28(1.875,-0.625) Un29(1.875,-1.875) Un30(1.875,-3.125) Un31(3.125,3.125) Un32(3.125,1.875) Un33(3.125,0.625) Un34(3.125,-0.625) Un35(3.125,-1.875) Un36(3.125,-3.125)
F.Cu:
  region: -3.688,4.038 -3.749,4.038 -3.812,4.101 -3.812,4.788 -3.688,4.788
  region: 3.812,4.101 3.749,4.038 3.688,4.038 3.688,4.788 3.812,4.788
  region: 4.788,3.688 4.038,3.688 4.038,3.749 4.101,3.812 4.788,3.812
  region: 4.788,-3.812 4.101,-3.812 4.038,-3.749 4.038,-3.688 4.788,-3.688
  region: 3.812,-4.101 3.812,-4.788 3.688,-4.788 3.688,-4.038 3.749,-4.038
  region: -3.688,-4.788 -3.812,-4.788 -3.812,-4.101 -3.749,-4.038 -3.688,-4.038
  region: -4.038,-3.749 -4.101,-3.812 -4.788,-3.812 -4.788,-3.688 -4.038,-3.688
  region: -4.038,3.749 -4.038,3.688 -4.788,3.688 -4.788,3.812 -4.101,3.812
F.SilkS:
  region: -4.61,4.61 -4.85,4.94 -4.37,4.94
  lines w0.254: -4.61,-4.135 -4.61,-4.61 -4.135,-4.61 ; -4.61,4.135 -4.61,4.37 ; -4.31,4.61 -4.135,4.61 ; 4.135,-4.61 4.61,-4.61 4.61,-4.135 ; 4.135,4.61 4.61,4.61 4.61,4.135
F.Paste:
  region: -3.688,4.038 -3.749,4.038 -3.812,4.101 -3.812,4.788 -3.688,4.788
  region: 3.812,4.101 3.749,4.038 3.688,4.038 3.688,4.788 3.812,4.788
  region: 4.788,3.688 4.038,3.688 4.038,3.749 4.101,3.812 4.788,3.812
  region: 4.788,-3.812 4.101,-3.812 4.038,-3.749 4.038,-3.688 4.788,-3.688
  region: 3.812,-4.101 3.812,-4.788 3.688,-4.788 3.688,-4.038 3.749,-4.038
  region: -3.688,-4.788 -3.812,-4.788 -3.812,-4.101 -3.749,-4.038 -3.688,-4.038
  region: -4.038,-3.749 -4.101,-3.812 -4.788,-3.812 -4.788,-3.688 -4.038,-3.688
  region: -4.038,3.749 -4.038,3.688 -4.788,3.688 -4.788,3.812 -4.101,3.812
F.Mask:
  region: -3.688,4.038 -3.749,4.038 -3.812,4.101 -3.812,4.788 -3.688,4.788
  region: 3.812,4.101 3.749,4.038 3.688,4.038 3.688,4.788 3.812,4.788
  region: 4.788,3.688 4.038,3.688 4.038,3.749 4.101,3.812 4.788,3.812
  region: 4.788,-3.812 4.101,-3.812 4.038,-3.749 4.038,-3.688 4.788,-3.688
  region: 3.812,-4.101 3.812,-4.788 3.688,-4.788 3.688,-4.038 3.749,-4.038
  region: -3.688,-4.788 -3.812,-4.788 -3.812,-4.101 -3.749,-4.038 -3.688,-4.038
  region: -4.038,-3.749 -4.101,-3.812 -4.788,-3.812 -4.788,-3.688 -4.038,-3.688
  region: -4.038,3.749 -4.038,3.688 -4.788,3.688 -4.788,3.812 -4.101,3.812
Top Component Center:
  lines w0.127: -0.127,0 0.127,0 -0.127,0 ; 0,-0.127 0,0.127 0,-0.127
Top Assembly:
  region: 4.5,-4.5 -4.5,-4.5 -4.5,3.5 -3.5,4.5 4.5,4.5
Top Courtyard:
  lines w0.254: -5.1,-4.13 -4.75,-4.13 -4.75,-4.75 -4.13,-4.75 -4.13,-5.1 4.13,-5.1 4.13,-4.75 4.75,-4.75 4.75,-4.13 5.1,-4.13 5.1,4.13 4.75,4.13 4.75,4.75 4.13,4.75 4.13,5.1 -4.13,5.1 -4.13,4.75 -4.75,4.75 -4.75,4.13 -5.1,4.13 -5.1,-4.13
Top Designator:
  text ".Designator" at -3.43,-0.344 h1.52
3D body "QFN-64-1EP_9x9mm_P0.5mm_EP7.35x7.35mm.step": height 0.75, standoff 0, extent -4.5,-4.5 4.5,4.5